# Altium footprint library Miscellaneous Devices.PcbLib: 306 footprints (part 17 of 20)
Each footprint in its own frame and in the unit in brackets; x right, y up, seen from the top. Pads: shape width x height; smd on the part's side, far side on the other; paste and mask are expansions set on the pad; w line width, h text height; cw(c..) or ccw(c..) is an arc to the next point about the centre after c.
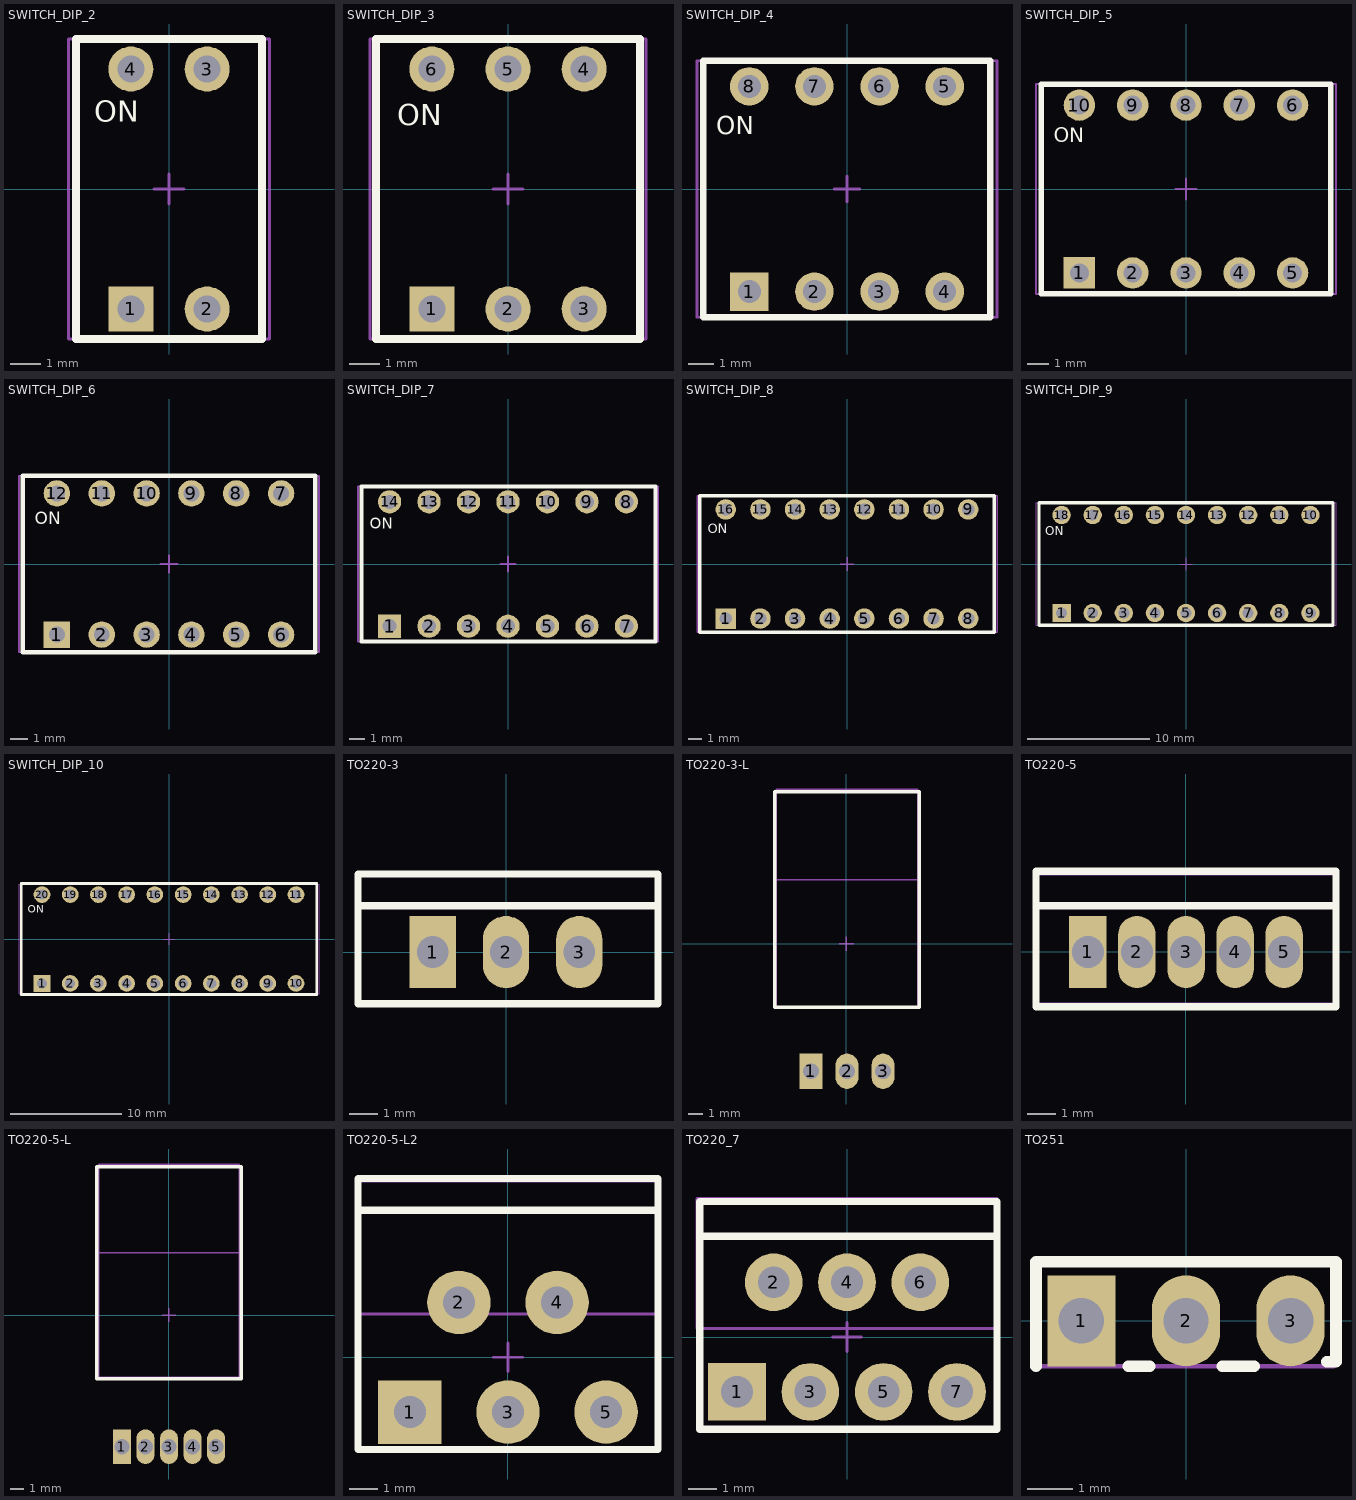
[diagram p16: the footprints below, top view; thin cyan lines are the x and y axes]

## SWITCH_DIP_2 [mm]
pads (4):
  rect 1.5x1.5 hole 0.9: 1(-1.27,-4)
  round 1.5 hole 0.9: 2(1.27,-4) 3(1.27,4) 4(-1.27,4)
Top Overlay:
  lines w0.254: -3.1,-5 -3.1,5 3.1,5 3.1,-5 -3.1,-5
  text "ON" at -2.5,2 h1.2
Mechanical 15:
  lines w0.1: -0.5,0 0.5,0 ; 0,-0.5 0,0.5 ; -3.35,-5 -3.35,5 3.35,5 3.35,-5 -3.35,-5
3D body: height 7, standoff -3.7, extent -3.07,-4.95 3.01,4.95

## SWITCH_DIP_3 [mm]
pads (6):
  rect 1.5x1.5 hole 0.9: 1(-2.54,-4)
  round 1.5 hole 0.9: 2(0,-4) 3(2.54,-4) 4(2.54,4) 5(0,4) 6(-2.54,4)
Top Overlay:
  lines w0.254: -4.4,-5 -4.4,5 4.4,5 4.4,-5 -4.4,-5
  text "ON" at -3.7,1.9 h1.2
Mechanical 15:
  lines w0.1: -0.5,0 0.5,0 ; 0,-0.5 0,0.5 ; -4.6,-5 4.6,-5 4.6,5 -4.6,5 -4.6,-5
3D body: height 7, standoff -3.7, extent -4.34,-4.95 4.28,4.95

## SWITCH_DIP_4 [mm]
pads (8):
  rect 1.5x1.5 hole 0.9: 1(-3.81,-4)
  round 1.5 hole 0.9: 2(-1.27,-4) 3(1.27,-4) 4(3.81,-4) 5(3.81,4) 6(1.27,4) 7(-1.27,4) 8(-3.81,4)
Top Overlay:
  lines w0.254: -5.6,-5 5.59,-5 5.59,5 -5.6,5 -5.6,-5
  text "ON" at -5.1,1.9 h1.2
Mechanical 15:
  lines w0.1: -0.5,0 0.5,0 ; 0,-0.5 0,0.5 ; -5.85,-5 5.85,-5 5.85,5 -5.85,5 -5.85,-5
3D body: height 7, standoff -3.7, extent -5.61,-4.95 5.55,4.95

## SWITCH_DIP_5 [mm]
pads (10):
  rect 1.5x1.5 hole 0.9: 1(-5.08,-4)
  round 1.5 hole 0.9: 2(-2.54,-4) 3(0,-4) 4(2.54,-4) 5(5.08,-4) 6(5.08,4) 7(2.54,4) 8(0,4) 9(-2.54,4) 10(-5.08,4)
Top Overlay:
  lines w0.254: -6.9,-5 -6.9,5 6.9,5 6.9,-5 -6.9,-5
  text "ON" at -6.3,2 h1.2
Mechanical 15:
  lines w0.1: -0.5,0 0.5,0 ; 0,-0.5 0,0.5 ; -7.15,-5 -7.15,5 7.15,5 7.15,-5 -7.15,-5
3D body: height 7, standoff -3.7, extent -6.88,-4.95 6.82,4.95

## SWITCH_DIP_6 [mm]
pads (12):
  rect 1.5x1.5 hole 0.9: 1(-6.35,-4)
  round 1.5 hole 0.9: 2(-3.81,-4) 3(-1.27,-4) 4(1.27,-4) 5(3.81,-4) 6(6.35,-4) 7(6.35,4) 8(3.81,4) 9(1.27,4) 10(-1.27,4) 11(-3.81,4) 12(-6.35,4)
Top Overlay:
  lines w0.254: -8.3,-5 8.3,-5 8.3,5 -8.3,5 -8.3,-5
  text "ON" at -7.6,2 h1.2
Mechanical 15:
  lines w0.1: -0.5,0 0.5,0 ; 0,-0.5 0,0.5 ; -8.5,-5 8.5,-5 8.5,5 -8.5,5 -8.5,-5
3D body: height 7, standoff -3.7, extent -8.15,-4.95 8.09,4.95

## SWITCH_DIP_7 [mm]
pads (14):
  rect 1.5x1.5 hole 0.9: 1(-7.62,-4)
  round 1.5 hole 0.9: 2(-5.08,-4) 3(-2.54,-4) 4(0,-4) 5(2.54,-4) 6(5.08,-4) 7(7.62,-4) 8(7.62,4) 9(5.08,4) 10(2.54,4) 11(0,4) 12(-2.54,4) 13(-5.08,4) 14(-7.62,4)
Top Overlay:
  lines w0.254: -9.42,-5 -9.42,5 9.5,5 9.5,-5 -9.42,-5
  text "ON" at -8.9,2 h1.2
Mechanical 15:
  lines w0.1: -0.5,0 0.5,0 ; 0,-0.5 0,0.5 ; -9.65,-5 -9.65,5 9.65,5 9.65,-5 -9.65,-5
3D body: height 7, standoff -3.7, extent -9.42,-4.95 9.66,4.95

## SWITCH_DIP_8 [mm]
pads (16):
  rect 1.5x1.5 hole 0.9: 1(-8.89,-4)
  round 1.5 hole 0.9: 2(-6.35,-4) 3(-3.81,-4) 4(-1.27,-4) 5(1.27,-4) 6(3.81,-4) 7(6.35,-4) 8(8.89,-4) 9(8.89,4) 10(6.35,4) 11(3.81,4) 12(1.27,4) 13(-1.27,4) 14(-3.81,4) 15(-6.35,4) 16(-8.89,4)
Top Overlay:
  lines w0.254: -10.8,-5 10.8,-5 10.8,5 -10.8,5 -10.8,-5
  text "ON" at -10.2,2 h1.2
Mechanical 15:
  lines w0.1: -0.5,0 0.5,0 ; 0,-0.5 0,0.5 ; -11,-5 11,-5 11,5 -11,5 -11,-5
3D body: height 7, standoff -3.7, extent -10.69,-4.95 10.63,4.95

## SWITCH_DIP_9 [mm]
pads (18):
  rect 1.5x1.5 hole 0.9: 1(-10.16,-4)
  round 1.5 hole 0.9: 2(-7.62,-4) 3(-5.08,-4) 4(-2.54,-4) 5(0,-4) 6(2.54,-4) 7(5.08,-4) 8(7.62,-4) 9(10.16,-4) 10(10.16,4) 11(7.62,4) 12(5.08,4) 13(2.54,4) 14(0,4) 15(-2.54,4) 16(-5.08,4) 17(-7.62,4) 18(-10.16,4)
Top Overlay:
  lines w0.254: -12,-5 12,-5 12,5 -12,5 -12,-5
  text "ON" at -11.5,2.1 h1.2
Mechanical 15:
  lines w0.1: -0.5,0 0.5,0 ; 0,-0.5 0,0.5 ; -12.25,-5 -12.25,5 12.25,5 12.25,-5 -12.25,-5
3D body: height 7, standoff -3.7, extent -11.96,-4.95 12.2,4.95

## SWITCH_DIP_10 [mm]
pads (20):
  rect 1.5x1.5 hole 0.9: 1(-11.43,-4)
  round 1.5 hole 0.9: 2(-8.89,-4) 3(-6.35,-4) 4(-3.81,-4) 5(-1.27,-4) 6(1.27,-4) 7(3.81,-4) 8(6.35,-4) 9(8.89,-4) 10(11.43,-4) 11(11.43,4) 12(8.89,4) 13(6.35,4) 14(3.81,4) 15(1.27,4) 16(-1.27,4) 17(-3.81,4) 18(-6.35,4) 19(-8.89,4) 20(-11.43,4)
Top Overlay:
  lines w0.254: -13.3,-5 13.3,-5 13.3,5 -13.3,5 -13.3,-5
  text "ON" at -12.7,2.1 h1.2
Mechanical 15:
  lines w0.1: -0.5,0 0.5,0 ; 0,-0.5 0,0.5 ; -13.5,-4.95 13.5,-4.95 13.5,4.95 -13.5,4.95 -13.5,-4.95
3D body: height 7, standoff -3.7, extent -13.23,-4.95 13.17,4.95

## TO220-3 [mm]
pads (3):
  rect 1.6x2.5 hole 1.1: 1(-2.54,0)
  oval 1.6x2.5 hole 1.1: 2(0,0) 3(2.54,0)
Top Overlay:
  lines w0.254: -5.132,1.606 5.268,1.606 ; -5.132,-1.794 -5.132,2.706 5.268,2.706 5.268,-1.794 -5.132,-1.794
Mechanical 15:
  lines w0.1: -5.132,-1.8 5.268,-1.8 5.268,2.7 -5.132,2.7 -5.132,-1.8
3D body: height 18.5, standoff -9.9, extent -5.132,-1.794 5.268,2.706

## TO220-3-L [mm]
pads (3):
  rect 1.6x2.5 hole 1.1: 1(-2.5,-9)
  oval 1.6x2.5 hole 1.1: 2(0.04,-9) 3(2.58,-9)
Top Overlay:
  lines w0.254: -5.06,-4.5 5.14,-4.5 5.14,10.7 -5.06,10.7 -5.06,-4.5
Mechanical 15:
  lines w0.1: -4.96,4.5 5.04,4.5 ; -0.5,0 0.5,0 ; 0,-0.5 0,0.5 ; -4.96,-4.5 -4.96,10.9 5.04,10.9 5.04,-4.5 -4.96,-4.5
3D body: height 4.5, standoff -3, extent -4.965,-9.24 5.035,10.464

## TO220-5 [mm]
pads (5):
  rect 1.3x2.5 hole 1.1: 1(-3.4,0)
  oval 1.3x2.5 hole 1.1: 2(-1.7,0) 3(0,0) 4(1.7,0) 5(3.4,0)
Top Overlay:
  lines w0.254: -5.2,1.6 5.2,1.6 ; -5.2,-1.9 5.2,-1.9 5.2,2.8 -5.2,2.8 -5.2,-1.9
Mechanical 15:
  lines w0.1: -5.2,-1.8 5.2,-1.8 5.2,2.7 -5.2,2.7 -5.2,-1.8
3D body: height 19.06, standoff -9.87, extent -5.081,-1.8 5.081,2.721

## TO220-5-L [mm]
pads (5):
  rect 1.3x2.5 hole 1.1: 1(-3.4,-9.5)
  oval 1.3x2.5 hole 1.1: 2(-1.7,-9.5) 3(0,-9.5) 4(1.7,-9.5) 5(3.4,-9.5)
Top Overlay:
  lines w0.254: -5.2,-4.6 -5.2,10.7 5.2,10.7 5.2,-4.6 -5.2,-4.6
Mechanical 15:
  lines w0.1: -5.081,4.5 5.081,4.5 ; -0.5,0 0.5,0 ; 0,-0.5 0,0.5 ; -5.081,-4.5 5.081,-4.5 5.081,10.9 -5.081,10.9 -5.081,-4.5
3D body: height 4.56, standoff -5.94, extent -5.081,-9.7 5.081,10.468

## TO220-5-L2 [mm]
pads (5):
  rect 2.2x2.2 hole 1.1: 1(-3.4,-1.9)
  round 2.2 hole 1.1: 2(-1.7,1.9) 3(0,-1.9) 4(1.7,1.9) 5(3.4,-1.9)
Top Overlay:
  lines w0.254: -5.2,5.1 5.2,5.1 ; -5.2,-3.2 -5.2,6.2 5.2,6.2 5.2,-3.2 -5.2,-3.2
Mechanical 15:
  lines w0.1: -0.5,0 0.5,0 ; 0,-0.5 0,0.5 ; -5.2,1.5 5.2,1.5 5.2,6.1 -5.2,6.1 -5.2,1.5
3D body: height 21.35, standoff -2.64, extent -5.08,-2.14 5.08,6.1

## TO220_7 [mm]
pads (7):
  rect 2x2 hole 1.1: 1(-3.81,-1.9)
  round 2 hole 1.1: 2(-2.54,1.9) 3(-1.27,-1.9) 4(0,1.9) 5(1.27,-1.9) 6(2.54,1.9) 7(3.81,-1.9)
Top Overlay:
  lines w0.254: -5.1,3.5 5.2,3.5 ; -5.1,-3.2 5.2,-3.2 5.2,4.7 -5.1,4.7 -5.1,-3.2
Mechanical 15:
  lines w0.1: -0.5,0 0.5,0 ; 0,-0.5 0,0.5 ; -5.2,0.3 -5.2,4.8 5.2,4.8 5.2,0.3 -5.2,0.3
3D body: height 21.3, standoff -2.22, extent -5.05,-1.969 5.11,4.769

## TO251 [mm]
pads (3):
  rect 1.5x2 hole 1: 1(-2.3,0)
  oval 1.5x2 hole 1: 2(0,0) 3(2.3,0)
Top Overlay:
  lines w0.254: -3.3,-1 -3.3,1.3 3.3,1.3 3.3,-0.9 3.1,-0.9 ; -1.275,-1 -0.8,-1 ; 0.8,-1 1.5,-1
Mechanical 15:
  lines w0.1: -3.25,-1 -3.25,1.3 3.25,1.3 3.25,-1 -3.25,-1
3D body: height 10.37, standoff -6.65, extent -3.25,-1 3.25,1.3